# Altium schematic symbol library TitansLib.SchLib: 462 symbols (part 5 of 24)
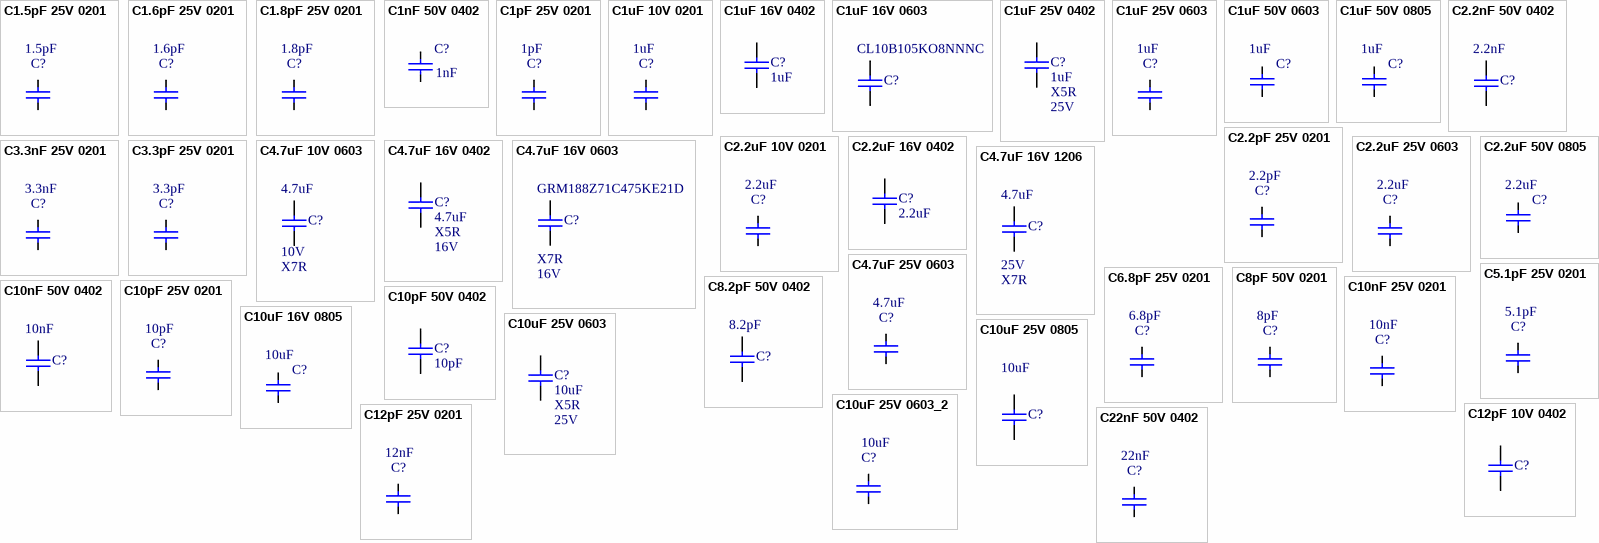
[diagram p21: symbols C1.5pF 25V 0201 to C22nF 50V 0402]

## C2.2pF 25V 0201
designator C?, comment value 2.2pF  (hidden comment: GRM0335C1E2R2CA01D)
25V 2.2pF C0G 0201 Multilayer Ceramic Capacitors MLCC - SMD/SMT ROHS; Manufacturer: Murata; Manufacturer Lifecycle Status: IN PRODUCTION; Temperature Coefficient: 30ppm/°C; Supplier: DigiKey; Supplier Part Number: 490-11293-1-ND; Manufacturer Part Number: GRM0335C1E2R2CA01D; RoHS: Compliant; Category: Ceramic Capacitors; Stock: 370916; Pricing: 1=0.1, 10=0.013, 50=0.0086, 100=0.0072, 500=0.00494, 1000=0.00424, 2500=0.00351, 5000=0.00308 (USD); Case/Package: 0201; Case Code (Imperial): 0201; Case Code (Metric): 0603; Dielectric: C0G; Dielectric Material: Ceramic; Export Control Classification Number (ECCN) Code: EAR99; Height: 300µm; Harmonized Tariff Schedule (HTS) Code: 8532.24.00.20; Introduction Date: 2013-05-17; Lead Free: Lead Free; Length: 600µm; Lifecycle Status: Production; Material: Ceramic; Max Operating Temperature: 125°C; Min Operating Temperature: -55°C; Mounting Technology: Surface Mount; Number of Terminals: 2; Packaging: Cut Tape; REACH SVHC: Yes; Schedule B: 8532240020, 8532240020|8532240020|8532240020|8532240020|8532240020; Termination: SMD/SMT; Thickness: 300µm; Voltage Rating: 25V; Voltage Rating (DC): 25V; Width: 300µm; ComponentLink1URL: https://datasheet.octopart.com:443/GRM0335C1E2R2CA01D-Murata-datasheet-62317014.pdf?src-supplier=element14+APAC; ComponentLink1Description: https://datasheet.octopart.com:443/GRM0335C1E2R2CA01D-Murata-datasheet-62317014.pdf?src-supplier=element14+APAC; ComponentLink2URL: https://datasheet.octopart.com:443/GRM0335C1E2R2CA01D-Murata-datasheet-165579666.pdf?src-supplier=TME; ComponentLink2Description: https://datasheet.octopart.com:443/GRM0335C1E2R2CA01D-Murata-datasheet-165579666.pdf?src-supplier=TME; ComponentLink3URL: https://datasheet.octopart.com:443/GRM0335C1E2R2CA01D-Murata-datasheet-141273941.pdf?src-supplier=Ciiva; ComponentLink3Description: https://datasheet.octopart.com:443/GRM0335C1E2R2CA01D-Murata-datasheet-141273941.pdf?src-supplier=Ciiva; ComponentLink4URL: https://datasheet.octopart.com:443/GRM0335C1E2R2CA01D-Murata-datasheet-140673953.pdf?src-supplier=Ciiva; ComponentLink4Description: https://datasheet.octopart.com:443/GRM0335C1E2R2CA01D-Murata-datasheet-140673953.pdf?src-supplier=Ciiva; ComponentLink5URL: https://datasheet.octopart.com:443/GRM0335C1E2R2CA01D-Murata-datasheet-138736733.pdf?src-supplier=Ciiva; ComponentLink5Description: https://datasheet.octopart.com:443/GRM0335C1E2R2CA01D-Murata-datasheet-138736733.pdf?src-supplier=Ciiva; ComponentLink6URL: https://datasheet.octopart.com:443/GRM0335C1E2R2CA01D-Murata-datasheet-102370999.pdf?src-supplier=HQonline; ComponentLink6Description: https://datasheet.octopart.com:443/GRM0335C1E2R2CA01D-Murata-datasheet-102370999.pdf?src-supplier=HQonline; ComponentLink7URL: https://datasheet.octopart.com:443/GRM0335C1E2R2CA01D-Murata-datasheet-22122223.pdf?src-supplier=Future+Electronics; ComponentLink7Description: https://datasheet.octopart.com:443/GRM0335C1E2R2CA01D-Murata-datasheet-22122223.pdf?src-supplier=Future+Electronics; ComponentLink8URL: https://datasheet.octopart.com:443/GRM0335C1E2R2CA01D-Murata-datasheet-12552025.pdf?src-supplier=Future+Electronics; ComponentLink8Description: https://datasheet.octopart.com:443/GRM0335C1E2R2CA01D-Murata-datasheet-12552025.pdf?src-supplier=Future+Electronics; ComponentLink9URL: https://datasheet.octopart.com/GRM0335C1E2R2CA01D-Murata-datasheet-12515295.pdf; ComponentLink9Description: https://datasheet.octopart.com/GRM0335C1E2R2CA01D-Murata-datasheet-12515295.pdf; ComponentLink10URL: https://datasheet.octopart.com/GRM0335C1E2R2CA01D-Murata-datasheet-12510076.pdf; ComponentLink10Description: https://datasheet.octopart.com/GRM0335C1E2R2CA01D-Murata-datasheet-12510076.pdf; ComponentLink11URL: https://datasheet.octopart.com/GRM0335C1E2R2CA01D-Murata-datasheet-11978611.pdf; ComponentLink11Description: https://datasheet.octopart.com/GRM0335C1E2R2CA01D-Murata-datasheet-11978611.pdf; ComponentLink12URL: https://datasheet.octopart.com/GRM0335C1E2R2CA01D-Murata-datasheet-10025737.pdf; ComponentLink12Description: https://datasheet.octopart.com/GRM0335C1E2R2CA01D-Murata-datasheet-10025737.pdf; ComponentLink13URL: https://datasheet.octopart.com/GRM0335C1E2R2CA01D-Murata-datasheet-8819587.pdf; ComponentLink13Description: https://datasheet.octopart.com/GRM0335C1E2R2CA01D-Murata-datasheet-8819587.pdf; ComponentLink14URL: https://datasheet.octopart.com/GRM0335C1E2R2CA01D-Murata-datasheet-14398016.pdf; ComponentLink14Description: https://datasheet.octopart.com/GRM0335C1E2R2CA01D-Murata-datasheet-14398016.pdf; ComponentLink15URL: http://sigma.octopart.com:80/reach_statement/Murata-company-16.pdf?src-supplier=Compliance+Statements; ComponentLink15Description: http://sigma.octopart.com:80/reach_statement/Murata-company-16.pdf?src-supplier=Compliance+Statements
footprint CAPC0603X03N (Chip Capacitor, 2-Leads, Body 0.60x0.30mm, IPC Medium Density)
pins: 1, 2

## C2.2uF 10V 0201
designator C?, comment value 2.2uF  (hidden comment: GRM033R61A225KE47D)
10V 2.2uF X5R ±10% 0201 Multilayer Ceramic Capacitors MLCC - SMD/SMT ROHS; Manufacturer: Murata; Manufacturer Lifecycle Status: IN PRODUCTION; Supplier: DigiKey; Supplier Part Number: 490-13227-1-ND; Manufacturer Part Number: GRM033R61A225KE47D; RoHS: Compliant; Category: Ceramic Capacitors; Stock: 2131851; Pricing: 1=0.14, 10=0.085, 50=0.068, 100=0.0512, 500=0.04, 1000=0.036, 2500=0.032, 5000=0.0296 (USD); Case/Package: 0201; Case Code (Imperial): 0201; Case Code (Metric): 0603; Country of Origin: Japan, Mainland China, Philippines, Singapore, Thailand; Dielectric: X5R; Dielectric Material: Ceramic; Export Control Classification Number (ECCN) Code: EAR99; Height: 300µm; Harmonized Tariff Schedule (HTS) Code: 8532.24.00.20; Introduction Date: 2017-02-17; Length: 600µm; Lifecycle Status: Production; Material: Ceramic; Max Operating Temperature: 85°C; Min Operating Temperature: -55°C; Mounting Technology: Surface Mount; Number of Terminals: 2; REACH SVHC: Yes; Schedule B: 8532240020, 8532240020|8532240020|8532240020|8532240020|8532240020|8532240020|8532240020|8532240020|8532240020|8532240020|8532240020|8532240020|8532240020|8532240020|8532240020|8532240020|8532240020|8532240020|8532240020|8532240020|8532240020|8532240020|8532240020|85; Thickness: 300µm; Tolerance: 10%; Voltage Rating: 10V; Voltage Rating (DC): 10V; Width: 300µm; ComponentLink1URL: https://datasheet.octopart.com:443/GRM033R61A225KE47D-Murata-datasheet-179072677.pdf?src-supplier=Arrow.cn; ComponentLink1Description: https://datasheet.octopart.com:443/GRM033R61A225KE47D-Murata-datasheet-179072677.pdf?src-supplier=Arrow.cn; ComponentLink2URL: https://datasheet.octopart.com:443/GRM033R61A225KE47D-Murata-datasheet-165579666.pdf?src-supplier=TME; ComponentLink2Description: https://datasheet.octopart.com:443/GRM033R61A225KE47D-Murata-datasheet-165579666.pdf?src-supplier=TME; ComponentLink3URL: https://datasheet.octopart.com:443/GRM033R61A225KE47D-Murata-datasheet-141274204.pdf?src-supplier=Ciiva; ComponentLink3Description: https://datasheet.octopart.com:443/GRM033R61A225KE47D-Murata-datasheet-141274204.pdf?src-supplier=Ciiva; ComponentLink4URL: https://datasheet.octopart.com:443/GRM033R61A225KE47D-Murata-datasheet-140676278.pdf?src-supplier=Ciiva; ComponentLink4Description: https://datasheet.octopart.com:443/GRM033R61A225KE47D-Murata-datasheet-140676278.pdf?src-supplier=Ciiva; ComponentLink5URL: https://datasheet.octopart.com:443/GRM033R61A225KE47D-Murata-datasheet-138738405.pdf?src-supplier=Ciiva; ComponentLink5Description: https://datasheet.octopart.com:443/GRM033R61A225KE47D-Murata-datasheet-138738405.pdf?src-supplier=Ciiva; ComponentLink6URL: https://datasheet.octopart.com:443/GRM033R61A225KE47D-Murata-datasheet-102370999.pdf?src-supplier=HQonline; ComponentLink6Description: https://datasheet.octopart.com:443/GRM033R61A225KE47D-Murata-datasheet-102370999.pdf?src-supplier=HQonline; ComponentLink7URL: https://datasheet.octopart.com:443/GRM033R61A225KE47D-Murata-datasheet-86568078.pdf?src-supplier=Future+Electronics; ComponentLink7Description: https://datasheet.octopart.com:443/GRM033R61A225KE47D-Murata-datasheet-86568078.pdf?src-supplier=Future+Electronics; ComponentLink8URL: https://datasheet.octopart.com/GRM033R61A225KE47D-Murata-datasheet-12515295.pdf; ComponentLink8Description: https://datasheet.octopart.com/GRM033R61A225KE47D-Murata-datasheet-12515295.pdf; ComponentLink9URL: https://datasheet.octopart.com/GRM033R61A225KE47D-Murata-datasheet-12510076.pdf; ComponentLink9Description: https://datasheet.octopart.com/GRM033R61A225KE47D-Murata-datasheet-12510076.pdf; ComponentLink10URL: https://datasheet.octopart.com/GRM033R61A225KE47D-Murata-datasheet-11978611.pdf; ComponentLink10Description: https://datasheet.octopart.com/GRM033R61A225KE47D-Murata-datasheet-11978611.pdf; ComponentLink11URL: https://datasheet.octopart.com/GRM033R61A225KE47D-Murata-datasheet-10025737.pdf; ComponentLink11Description: https://datasheet.octopart.com/GRM033R61A225KE47D-Murata-datasheet-10025737.pdf; ComponentLink12URL: https://datasheet.octopart.com/GRM033R61A225KE47D-Murata-datasheet-8819587.pdf; ComponentLink12Description: https://datasheet.octopart.com/GRM033R61A225KE47D-Murata-datasheet-8819587.pdf; ComponentLink13URL: http://sigma.octopart.com:80/reach_statement/Murata-company-16.pdf?src-supplier=Compliance+Statements; ComponentLink13Description: http://sigma.octopart.com:80/reach_statement/Murata-company-16.pdf?src-supplier=Compliance+Statements; Supplier 1: DigiKey; Supplier Part Number 1: 490-13227-1-ND; Supplier 2: DigiKey; Supplier Part Number 2: 490-13227-2-ND; Supplier 3: Mouser; Supplier Part Number 3: 81-GRM033R61A225KE7D
footprint CAPC0603X03N (Chip Capacitor, 2-Leads, Body 0.60x0.30mm, IPC Medium Density)
pins: 1, 2

## C2.2uF 16V 0402
designator C?, comment 2.2uF
2.2uF 16V X5R 20% 0402; Manufacturer: Samsung Electro-Mechanics; Manufacturer Part Number: CL05A225MO5NQNC; Type: Capacitor; Package: 0402 (1005 Metric); Tolerance: 20%; Temp Coef: X5R; Voltage: 16V; Supplier 1: Mouser; Supplier Part Number 1: 187-CL05A225MO5NQNC; Value: 2.2uF
footprint C0402_H0P7
pins: 1, 2

## C2.2uF 25V 0603
designator C?, comment value 2.2uF  (hidden comment: GRM188R61E225KA12D)
25V 2.2uF X5R ±10% 0603 Multilayer Ceramic Capacitors MLCC - SMD/SMT ROHS; Manufacturer: Murata; Manufacturer Lifecycle Status: IN PRODUCTION; Supplier: DigiKey; Supplier Part Number: 490-10731-1-ND; Manufacturer Part Number: GRM188R61E225KA12D; RoHS: Compliant; Category: Ceramic Capacitors; Stock: 245508; Pricing: 1=0.1, 10=0.048, 50=0.0328, 100=0.0283, 500=0.0259 (USD); Case/Package: 0603; Case Code (Imperial): 0603; Case Code (Metric): 1608; Composition: Ceramic; Country of Origin: Japan, Mainland China, Philippines, Singapore, Thailand; Depth: 800µm; Dielectric: X5R; Dielectric Material: Ceramic; Export Control Classification Number (ECCN) Code: EAR99; Height: 800µm; Harmonized Tariff Schedule (HTS) Code: 8532.24.00.20; Introduction Date: 2012-10-01; Lead Free: Lead Free; Length: 1.6mm; Lifecycle Status: Production; Material: Ceramic; Max Operating Temperature: 85°C; Min Operating Temperature: -55°C; Mounting Technology: Surface Mount; Pins: 2; Number of Terminals: 2; Packaging: Cut Tape; Radiation Hardening: No; REACH SVHC: Yes; Schedule B: 8532240020, 8532240020|8532240020, 8532240020|8532240020|8532240020, 8532240020|8532240020|8532240020|8532240020; Termination: SMD/SMT; Thickness: 800µm; Tolerance: 10%; Voltage: 25V; Voltage Rating: 25V; Voltage Rating (DC): 25V; Weight: 6.293594mg; Width: 800µm; ComponentLink1URL: https://datasheet.octopart.com:443/GRM188R61E225KA12D-Murata-datasheet-62317198.pdf?src-supplier=element14+APAC; ComponentLink1Description: https://datasheet.octopart.com:443/GRM188R61E225KA12D-Murata-datasheet-62317198.pdf?src-supplier=element14+APAC; ComponentLink2URL: https://datasheet.octopart.com:443/GRM188R61E225KA12D-Murata-datasheet-17853099.pdf?src-supplier=element14+APAC; ComponentLink2Description: https://datasheet.octopart.com:443/GRM188R61E225KA12D-Murata-datasheet-17853099.pdf?src-supplier=element14+APAC; ComponentLink3URL: https://datasheet.octopart.com/GRM188R61E225KA12D-Murata-datasheet-12515295.pdf; ComponentLink3Description: https://datasheet.octopart.com/GRM188R61E225KA12D-Murata-datasheet-12515295.pdf; ComponentLink4URL: https://datasheet.octopart.com/GRM188R61E225KA12D-Murata-datasheet-12510076.pdf; ComponentLink4Description: https://datasheet.octopart.com/GRM188R61E225KA12D-Murata-datasheet-12510076.pdf; ComponentLink5URL: https://datasheet.octopart.com/GRM188R61E225KA12D-Murata-datasheet-11978611.pdf; ComponentLink5Description: https://datasheet.octopart.com/GRM188R61E225KA12D-Murata-datasheet-11978611.pdf; ComponentLink6URL: https://datasheet.octopart.com/GRM188R61E225KA12D-Murata-datasheet-10025737.pdf; ComponentLink6Description: https://datasheet.octopart.com/GRM188R61E225KA12D-Murata-datasheet-10025737.pdf; ComponentLink7URL: https://datasheet.octopart.com/GRM188R61E225KA12D-Murata-datasheet-8819587.pdf; ComponentLink7Description: https://datasheet.octopart.com/GRM188R61E225KA12D-Murata-datasheet-8819587.pdf; ComponentLink8URL: https://datasheet.octopart.com/GRM188R61E225KA12D-Murata-datasheet-14397280.pdf; ComponentLink8Description: https://datasheet.octopart.com/GRM188R61E225KA12D-Murata-datasheet-14397280.pdf; ComponentLink9URL: https://datasheet.octopart.com:443/GRM188R61E225KA12D-Murata-datasheet-165579666.pdf?src-supplier=TME; ComponentLink9Description: https://datasheet.octopart.com:443/GRM188R61E225KA12D-Murata-datasheet-165579666.pdf?src-supplier=TME; ComponentLink10URL: https://datasheet.octopart.com:443/GRM188R61E225KA12D-Murata-datasheet-141274968.pdf?src-supplier=Ciiva; ComponentLink10Description: https://datasheet.octopart.com:443/GRM188R61E225KA12D-Murata-datasheet-141274968.pdf?src-supplier=Ciiva; ComponentLink11URL: https://datasheet.octopart.com:443/GRM188R61E225KA12D-Murata-datasheet-140705128.pdf?src-supplier=Ciiva; ComponentLink11Description: https://datasheet.octopart.com:443/GRM188R61E225KA12D-Murata-datasheet-140705128.pdf?src-supplier=Ciiva; ComponentLink12URL: https://datasheet.octopart.com:443/GRM188R61E225KA12D-Murata-datasheet-138742892.pdf?src-supplier=Ciiva; ComponentLink12Description: https://datasheet.octopart.com:443/GRM188R61E225KA12D-Murata-datasheet-138742892.pdf?src-supplier=Ciiva; ComponentLink13URL: https://datasheet.octopart.com:443/GRM188R61E225KA12D-Murata-datasheet-22122223.pdf?src-supplier=Future+Electronics; ComponentLink13Description: https://datasheet.octopart.com:443/GRM188R61E225KA12D-Murata-datasheet-22122223.pdf?src-supplier=Future+Electronics; ComponentLink14URL: https://datasheet.octopart.com:443/GRM188R61E225KA12D-Murata-datasheet-8817987.pdf?src-supplier=Newark; ComponentLink14Description: https://datasheet.octopart.com:443/GRM188R61E225KA12D-Murata-datasheet-8817987.pdf?src-supplier=Newark; ComponentLink15URL: http://sigma.octopart.com:80/reach_statement/Murata-company-16.pdf?src-supplier=Compliance+Statements; ComponentLink15Description: http://sigma.octopart.com:80/reach_statement/Murata-company-16.pdf?src-supplier=Compliance+Statements
footprint CAPC1608X10N (Chip Capacitor, 2-Leads, Body 1.60x0.80mm, IPC Medium Density)
pins: 1, 2

## C2.2uF 50V 0805
designator C?, comment value 2.2uF  (hidden comment: UMK212BB7225KG-T)
0805 2.2 uF 50 V ±10% Tolerance X7R Surface Mount Multilayer Ceramic Capacitor; Manufacturer 1: Taiyo Yuden; Voltage Rating: 50V; Supplier 1: DigiKey; Supplier Part Number 1: 587-3169-1-ND; Manufacturer Part Number 1: UMK212BB7225KG-T; RoHS: Compliant; Category: Ceramic Capacitors; Stock: 380895; Supplier Unit Price 1: 0.29; Case/Package: 0805; Case Code (Imperial): 0805; Case Code (Metric): 2012; Depth: 1.25mm; Dielectric: X7R; Dielectric Material: Ceramic; Halogen Free: Halogen Free; Height: 1.25mm; Lead Free: Lead Free; Length: 2mm; Lifecycle Status: Production; Material: Ceramic; Max Operating Temperature: 125°C; Min Operating Temperature: -55°C; Mounting Technology: Surface Mount; Number of Terminals: 2; Radiation Hardening: No; REACH SVHC: Yes; Schedule B: 8532240020; Termination: SMD/SMT; Thickness: 1.4478mm; Tolerance: 10%; Voltage Rating (DC): 50V; Width: 1.25mm; ComponentLink1URL: https://datasheet.octopart.com:443/UMK212BB7225KG-T-Taiyo-Yuden-datasheet-182121079.pdf?src-supplier=IHS; ComponentLink1Description: https://datasheet.octopart.com:443/UMK212BB7225KG-T-Taiyo-Yuden-datasheet-182121079.pdf?src-supplier=IHS; ComponentLink2URL: https://datasheet.octopart.com:443/UMK212BB7225KG-T-Taiyo-Yuden-datasheet-151625811.pdf?src-supplier=element14+APAC; ComponentLink2Description: https://datasheet.octopart.com:443/UMK212BB7225KG-T-Taiyo-Yuden-datasheet-151625811.pdf?src-supplier=element14+APAC; ComponentLink3URL: https://datasheet.octopart.com:443/UMK212BB7225KG-T-Taiyo-Yuden-datasheet-33009199.pdf?src-supplier=Newark; ComponentLink3Description: https://datasheet.octopart.com:443/UMK212BB7225KG-T-Taiyo-Yuden-datasheet-33009199.pdf?src-supplier=Newark; ComponentLink4URL: https://datasheet.octopart.com:443/UMK212BB7225KG-T-Taiyo-Yuden-datasheet-154810193.pdf?src-supplier=Master+Electronics; ComponentLink4Description: https://datasheet.octopart.com:443/UMK212BB7225KG-T-Taiyo-Yuden-datasheet-154810193.pdf?src-supplier=Master+Electronics; ComponentLink5URL: https://datasheet.octopart.com:443/UMK212BB7225KG-T-Taiyo-Yuden-datasheet-140473435.pdf?src-supplier=Master+Electronics; ComponentLink5Description: https://datasheet.octopart.com:443/UMK212BB7225KG-T-Taiyo-Yuden-datasheet-140473435.pdf?src-supplier=Master+Electronics; ComponentLink6URL: https://datasheet.octopart.com/UMK212BB7225KG-T-Taiyo-Yuden-datasheet-13698913.pdf; ComponentLink6Description: https://datasheet.octopart.com/UMK212BB7225KG-T-Taiyo-Yuden-datasheet-13698913.pdf; ComponentLink7URL: https://datasheet.octopart.com:443/UMK212BB7225KG-T-Taiyo-Yuden-datasheet-138738940.pdf?src-supplier=Taiyo+Yuden+SCT; ComponentLink7Description: https://datasheet.octopart.com:443/UMK212BB7225KG-T-Taiyo-Yuden-datasheet-138738940.pdf?src-supplier=Taiyo+Yuden+SCT; ComponentLink8URL: https://datasheet.octopart.com:443/UMK212BB7225KG-T-Taiyo-Yuden-datasheet-103094781.pdf?src-supplier=Future+Electronics; ComponentLink8Description: https://datasheet.octopart.com:443/UMK212BB7225KG-T-Taiyo-Yuden-datasheet-103094781.pdf?src-supplier=Future+Electronics; ComponentLink9URL: https://datasheet.octopart.com:443/UMK212BB7225KG-T-Taiyo-Yuden-datasheet-99833418.pdf?src-supplier=Future+Electronics; ComponentLink9Description: https://datasheet.octopart.com:443/UMK212BB7225KG-T-Taiyo-Yuden-datasheet-99833418.pdf?src-supplier=Future+Electronics; ComponentLink10URL: https://datasheet.octopart.com:443/UMK212BB7225KG-T-Taiyo-Yuden-datasheet-62109645.pdf?src-supplier=Electro+Sonic; ComponentLink10Description: https://datasheet.octopart.com:443/UMK212BB7225KG-T-Taiyo-Yuden-datasheet-62109645.pdf?src-supplier=Electro+Sonic; ComponentLink11URL: https://datasheet.octopart.com:443/UMK212BB7225KG-T-Taiyo-Yuden-datasheet-41181901.pdf?src-supplier=Electro+Sonic; ComponentLink11Description: https://datasheet.octopart.com:443/UMK212BB7225KG-T-Taiyo-Yuden-datasheet-41181901.pdf?src-supplier=Electro+Sonic
footprint CAP0805-M (Chip Capacitor, 2-Leads, Body 2.00x1.25mm, IPC Medium Density)
pins: 1, 2

## C3.3nF 25V 0201
designator C?, comment value 3.3nF  (hidden comment: GRM033R71E332KA12D)
25V 3.3nF X7R ±10% 0201 Multilayer Ceramic Capacitors MLCC - SMD/SMT ROHS; Manufacturer: Murata; Manufacturer Lifecycle Status: IN PRODUCTION; Supplier: DigiKey; Supplier Part Number: 490-17827-1-ND; Manufacturer Part Number: GRM033R71E332KA12D; RoHS: Compliant; Category: Ceramic Capacitors; Stock: 193900; Pricing: 1=0.1, 10=0.013, 50=0.0086, 100=0.0072, 500=0.00494, 1000=0.00424, 2500=0.00351, 5000=0.00308 (USD); Case/Package: 0201; Case Code (Imperial): 0201; Case Code (Metric): 0603; Composition: Ceramic; Dielectric: X7R; Dielectric Material: Ceramic; Height: 300µm; Length: 600µm; Lifecycle Status: Production; Material: Ceramic; Max Operating Temperature: 125°C; Min Operating Temperature: -55°C; Mounting Technology: Surface Mount; Number of Terminals: 2; Packaging: Tape & Reel (TR); REACH SVHC: Yes; Schedule B: 8532240020, 8532240020|8532240020, 8532240020|8532240020|8532240020, 8532240020|8532240020|8532240020|8532240020; Termination: SMD/SMT; Thickness: 300µm; Tolerance: 10%; Voltage Rating: 25V; Voltage Rating (DC): 25V; Weight: 340.194278µg; Width: 300µm; ComponentLink1URL: https://datasheet.octopart.com:443/GRM033R71E332KA12D-Murata-datasheet-165579666.pdf?src-supplier=TME; ComponentLink1Description: https://datasheet.octopart.com:443/GRM033R71E332KA12D-Murata-datasheet-165579666.pdf?src-supplier=TME; ComponentLink2URL: https://datasheet.octopart.com:443/GRM033R71E332KA12D-Murata-datasheet-140678106.pdf?src-supplier=Ciiva; ComponentLink2Description: https://datasheet.octopart.com:443/GRM033R71E332KA12D-Murata-datasheet-140678106.pdf?src-supplier=Ciiva; ComponentLink3URL: https://datasheet.octopart.com:443/GRM033R71E332KA12D-Murata-datasheet-140677062.pdf?src-supplier=Ciiva; ComponentLink3Description: https://datasheet.octopart.com:443/GRM033R71E332KA12D-Murata-datasheet-140677062.pdf?src-supplier=Ciiva; ComponentLink4URL: https://datasheet.octopart.com:443/GRM033R71E332KA12D-Murata-datasheet-138738684.pdf?src-supplier=Ciiva; ComponentLink4Description: https://datasheet.octopart.com:443/GRM033R71E332KA12D-Murata-datasheet-138738684.pdf?src-supplier=Ciiva; ComponentLink5URL: https://datasheet.octopart.com/GRM033R71E332KA12D-Murata-datasheet-12515295.pdf; ComponentLink5Description: https://datasheet.octopart.com/GRM033R71E332KA12D-Murata-datasheet-12515295.pdf; ComponentLink6URL: https://datasheet.octopart.com/GRM033R71E332KA12D-Murata-datasheet-12510076.pdf; ComponentLink6Description: https://datasheet.octopart.com/GRM033R71E332KA12D-Murata-datasheet-12510076.pdf; ComponentLink7URL: https://datasheet.octopart.com/GRM033R71E332KA12D-Murata-datasheet-11978611.pdf; ComponentLink7Description: https://datasheet.octopart.com/GRM033R71E332KA12D-Murata-datasheet-11978611.pdf; ComponentLink8URL: https://datasheet.octopart.com/GRM033R71E332KA12D-Murata-datasheet-10025737.pdf; ComponentLink8Description: https://datasheet.octopart.com/GRM033R71E332KA12D-Murata-datasheet-10025737.pdf; ComponentLink9URL: https://datasheet.octopart.com/GRM033R71E332KA12D-Murata-datasheet-8819587.pdf; ComponentLink9Description: https://datasheet.octopart.com/GRM033R71E332KA12D-Murata-datasheet-8819587.pdf; ComponentLink10URL: https://datasheet.octopart.com/GRM033R71E332KA12D-Murata-datasheet-38882223.pdf; ComponentLink10Description: https://datasheet.octopart.com/GRM033R71E332KA12D-Murata-datasheet-38882223.pdf; ComponentLink11URL: https://datasheet.octopart.com:443/GRM033R71E332KA12D-Murata-datasheet-140568783.pdf?src-supplier=Arrow.cn; ComponentLink11Description: https://datasheet.octopart.com:443/GRM033R71E332KA12D-Murata-datasheet-140568783.pdf?src-supplier=Arrow.cn; ComponentLink12URL: http://sigma.octopart.com:80/reach_statement/Murata-company-16.pdf?src-supplier=Compliance+Statements; ComponentLink12Description: http://sigma.octopart.com:80/reach_statement/Murata-company-16.pdf?src-supplier=Compliance+Statements; Supplier 1: DigiKey; Supplier Part Number 1: 490-17827-1-ND; Supplier 2: DigiKey; Supplier Part Number 2: 490-17827-2-ND; Supplier 3: Mouser; Supplier Part Number 3: 81-GRM033R71E332KA2D
footprint CAPC0603X03N (Chip Capacitor, 2-Leads, Body 0.60x0.30mm, IPC Medium Density)
pins: 1, 2

## C3.3pF 25V 0201
designator C?, comment value 3.3pF  (hidden comment: GRM0335C1E3R3BA01D)
0201 3.3 pF 25 V ±0.1 pF Tolerance C0G Multilayer Ceramic Chip Capacitor; Manufacturer: Murata; Manufacturer Lifecycle Status: IN PRODUCTION; Temperature Coefficient: 30ppm/°C; Voltage Rating: 25V; Supplier: DigiKey; Supplier Part Number: 490-11296-1-ND; Manufacturer Part Number: GRM0335C1E3R3BA01D; RoHS: Compliant; Category: Ceramic Capacitors; Stock: 260800; Pricing: 1=0.1, 10=0.018, 50=0.0116, 100=0.0098, 500=0.0068, 1000=0.00587, 2500=0.00491, 5000=0.00433 (USD); Case/Package: 0201; Case Code (Imperial): 0201; Case Code (Metric): 0603; Depth: 300µm; Dielectric: C0G; Dielectric Material: Ceramic; Export Control Classification Number (ECCN) Code: EAR99; Height: 300µm; Harmonized Tariff Schedule (HTS) Code: 8532.24.00.20; Introduction Date: 2013-05-17; Length: 600µm; Lifecycle Status: Production; Material: Ceramic; Max Operating Temperature: 125°C; Min Operating Temperature: -55°C; Mounting Technology: Surface Mount; Number of Terminals: 2; REACH SVHC: Yes; Schedule B: 8532240020, 8532240020|8532240020|8532240020|8532240020|8532240020; Termination: SMD/SMT; Thickness: 300µm; Voltage Rating (DC): 25V; Width: 300µm; ComponentLink1URL: https://datasheet.octopart.com:443/GRM0335C1E3R3BA01D-Murata-datasheet-141273978.pdf?src-supplier=Geoflip; ComponentLink1Description: https://datasheet.octopart.com:443/GRM0335C1E3R3BA01D-Murata-datasheet-141273978.pdf?src-supplier=Geoflip; ComponentLink2URL: https://datasheet.octopart.com:443/GRM0335C1E3R3BA01D-Murata-datasheet-165579666.pdf?src-supplier=TME; ComponentLink2Description: https://datasheet.octopart.com:443/GRM0335C1E3R3BA01D-Murata-datasheet-165579666.pdf?src-supplier=TME; ComponentLink3URL: https://datasheet.octopart.com:443/GRM0335C1E3R3BA01D-Murata-datasheet-140674001.pdf?src-supplier=Ciiva; ComponentLink3Description: https://datasheet.octopart.com:443/GRM0335C1E3R3BA01D-Murata-datasheet-140674001.pdf?src-supplier=Ciiva; ComponentLink4URL: https://datasheet.octopart.com:443/GRM0335C1E3R3BA01D-Murata-datasheet-138736781.pdf?src-supplier=Ciiva; ComponentLink4Description: https://datasheet.octopart.com:443/GRM0335C1E3R3BA01D-Murata-datasheet-138736781.pdf?src-supplier=Ciiva; ComponentLink5URL: https://datasheet.octopart.com:443/GRM0335C1E3R3BA01D-Murata-datasheet-96971104.pdf?src-supplier=Future+Electronics; ComponentLink5Description: https://datasheet.octopart.com:443/GRM0335C1E3R3BA01D-Murata-datasheet-96971104.pdf?src-supplier=Future+Electronics; ComponentLink6URL: https://datasheet.octopart.com:443/GRM0335C1E3R3BA01D-Murata-datasheet-98239046.pdf?src-supplier=Future+Electronics; ComponentLink6Description: https://datasheet.octopart.com:443/GRM0335C1E3R3BA01D-Murata-datasheet-98239046.pdf?src-supplier=Future+Electronics; ComponentLink7URL: https://datasheet.octopart.com:443/GRM0335C1E3R3BA01D-Murata-datasheet-32479577.pdf?src-supplier=HQonline; ComponentLink7Description: https://datasheet.octopart.com:443/GRM0335C1E3R3BA01D-Murata-datasheet-32479577.pdf?src-supplier=HQonline; ComponentLink8URL: https://datasheet.octopart.com/GRM0335C1E3R3BA01D-Murata-datasheet-12515295.pdf; ComponentLink8Description: https://datasheet.octopart.com/GRM0335C1E3R3BA01D-Murata-datasheet-12515295.pdf; ComponentLink9URL: https://datasheet.octopart.com/GRM0335C1E3R3BA01D-Murata-datasheet-12510076.pdf; ComponentLink9Description: https://datasheet.octopart.com/GRM0335C1E3R3BA01D-Murata-datasheet-12510076.pdf; ComponentLink10URL: https://datasheet.octopart.com/GRM0335C1E3R3BA01D-Murata-datasheet-11978611.pdf; ComponentLink10Description: https://datasheet.octopart.com/GRM0335C1E3R3BA01D-Murata-datasheet-11978611.pdf; ComponentLink11URL: https://datasheet.octopart.com/GRM0335C1E3R3BA01D-Murata-datasheet-10025737.pdf; ComponentLink11Description: https://datasheet.octopart.com/GRM0335C1E3R3BA01D-Murata-datasheet-10025737.pdf; ComponentLink12URL: https://datasheet.octopart.com/GRM0335C1E3R3BA01D-Murata-datasheet-8819587.pdf; ComponentLink12Description: https://datasheet.octopart.com/GRM0335C1E3R3BA01D-Murata-datasheet-8819587.pdf; ComponentLink13URL: https://datasheet.octopart.com/GRM0335C1E3R3BA01D-Murata-datasheet-14398041.pdf; ComponentLink13Description: https://datasheet.octopart.com/GRM0335C1E3R3BA01D-Murata-datasheet-14398041.pdf; ComponentLink14URL: http://sigma.octopart.com:80/reach_statement/Murata-company-16.pdf?src-supplier=Compliance+Statements; ComponentLink14Description: http://sigma.octopart.com:80/reach_statement/Murata-company-16.pdf?src-supplier=Compliance+Statements
footprint CAPC0603X03N (Chip Capacitor, 2-Leads, Body 0.60x0.30mm, IPC Medium Density)
pins: 1, 2

## C4.7uF 10V 0603
designator C?, comment Temperature Characteristics Code: X7R  Rated DC Voltage (URdc): 10V  (hidden comment: 4.7uF)
4.7uF 10V X7R 10% 0603; Manufacturer: Murata; Manufacturer Part Number: GRM188Z71A475KE15J; Dielectric Material: Ceramic; Multilayer: Yes; Supplier: Arrow Electronics; Supplier Part Number: GRM188Z71A475KE15J; RoHS: Yes; Category: Ceramic Capacitors; Stock: 10000; Pricing: 10000=0.0365 (USD); Mounting Technology: Surface Mount; Pins: 2; Package Shape: Rectangular; Case/Package: 0603; Terminal Finish: Nickel; Min Operating Temperature: -55°C; Max Operating Temperature: 125°C; JESD-609 Code: e3; Capacitor Type: Ceramic; Tolerance  (fill in as +-): 10%; Packaging: Tape and Reel; Tolerance (fill in as +-): 10%; Termination: Wraparound; Reach SVHC Compliant: Yes; RoHS Compliant: Yes; ComponentLink1URL: https://datasheet.ciiva.com:443/pdfs/VipMasterIC/IC/MURE/MURE-S-A0004349797/MURE-S-A0004352832-1.pdf?src-supplier=IHS+Markit; ComponentLink1Description: https://datasheet.ciiva.com:443/pdfs/VipMasterIC/IC/MURE/MURE-S-A0004349797/MURE-S-A0004352832-1.pdf?src-supplier=IHS+Markit; Value: 4.7uF
footprint C0603_H0P8
pins: 1, 2

## C4.7uF 16V 0402
designator C?, comment Temp Coef: X5R  Voltage: 16V  (hidden comment: 4.7uF)
4.7uF 16V X5R 20% 0402; Manufacturer: Samsung Electro-Mechanics; Manufacturer Part Number: CL05A475MO5NUNC; Type: Capacitor; Package: 0402 (1005 Metric); Supplier 1: Digikey; Supplier Part Number 1: 1276-6836-1-ND; Supplier Link 1: https://www.digikey.com/product-detail/en/samsung-electro-mechanics/CL05A475MO5NUNC/1276-6836-1-ND/5961695; Datasheet: http://www.samsungsem.com/kr/support/product-search/mlcc/__icsFiles/afieldfile/2019/05/29/Data%20sheet_CL05A475MO5NUNC.pdf; Tolerance: 20%; Value: 4.7uF
footprint C0402_H0P7
pins: 1, 2

## C4.7uF 16V 0603
designator C?, comment GRM188Z71C475KE21D  Rated DC Voltage (URdc): 16V  Temperature Characteristics Code: X7R
4.7uF 16V X7R 10% 0603; Manufacturer: Murata; Dielectric Material: Ceramic; Multilayer: Yes; Supplier: Digikey; Supplier Part Number: 490-GRM188Z71C475KE21DTR-ND; Manufacturer Part Number: GRM188Z71C475KE21D; RoHS: Yes; Category: Ceramic Capacitors; Stock: 108906; Pricing: 4000=0.05292, 8000=0.04767, 12000=0.0464, 20000=0.04578, 28000=0.04466, 40000=0.04357, 48000=0.04306, 96000=0.04151, 100000=0.04124 (USD); Mounting Technology: Surface Mount; Pins: 2; Package Shape: Rectangular; Case/Package: 0603; Terminal Finish: Nickel; Min Operating Temperature: -55°C; Max Operating Temperature: 125°C; JESD-609 Code: e3; Value: 4.7uF; Capacitor Type: Ceramic; Tolerance  (fill in as +-): 10%; Packaging: Tape and Reel; Tolerance (fill in as +-): 10%; Termination: Wraparound; Reach SVHC Compliant: Yes; RoHS Compliant: Yes; ComponentLink1URL: https://psearch.en.murata.com:443/capacitor/product/GRM188Z71C475KE21%23.pdf?src-supplier=IHS+Markit; ComponentLink1Description: https://psearch.en.murata.com:443/capacitor/product/GRM188Z71C475KE21%23.pdf?src-supplier=IHS+Markit; ComponentLink2URL: https://datasheet.octopart.com/GRM188Z71C475KE21D-Murata-datasheet-165579666.pdf?src-supplier=TME; ComponentLink2Description: https://datasheet.octopart.com/GRM188Z71C475KE21D-Murata-datasheet-165579666.pdf?src-supplier=TME; Supplier 1: DigiKey; Supplier Part Number 1: 490-GRM188Z71C475KE21DCT-ND; Supplier 2: DigiKey; Supplier Part Number 2: 490-GRM188Z71C475KE21DDKR-ND; Supplier 3: Mouser; Supplier Part Number 3: 81-GRM188Z71C475KE1D; Supplier 4: LCSC; Supplier Part Number 4: C389010
footprint C0603_H0P8
pins: 1, 2

## C4.7uF 16V 1206
designator C?, comment Temperature Characteristics Code: X7R  Rated DC Voltage (URdc): 25V  (hidden comment: 4.7uF)
4.7uF 16V X7R 10% 1206; Manufacturer: Murata; Manufacturer Part Number: GCM31CR71E475KA55L; Dielectric Material: Ceramic; Multilayer: Yes; Reference Standard: AEC-Q200; Supplier Part Number: GCM31CR71E475KA55L; RoHS: Yes; Category: Ceramic Capacitors; Stock: 6000; Pricing: 2000=0.05338, 4000=0.05338, 8000=0.05338, 12000=0.05338, 16000=0.05338 (USD); Mounting Technology: Surface Mount; Pins: 2; Package Shape: Rectangular; Case/Package: 1206; Terminal Finish: Nickel; Min Operating Temperature: -55°C; Max Operating Temperature: 125°C; JESD-609 Code: e3; Capacitor Type: Ceramic; Tolerance  (fill in as +-): 10%; Package Style: SMTMeter; Packaging: Tape and Reel; Tolerance (fill in as +-): 10%; Termination: Wraparound; Length: 3.2mm; Width: 1.6mm; Height: 1.8mm; Reach SVHC Compliant: Yes; RoHS Compliant: Yes; ComponentLink1URL: https://datasheet.ciiva.com:443/pdfs/VipMasterIC/IC/MURE/MURE-S-A0004442191/MURE-S-A0004445513-1.pdf?src-supplier=IHS+Markit; ComponentLink1Description: https://datasheet.ciiva.com:443/pdfs/VipMasterIC/IC/MURE/MURE-S-A0004442191/MURE-S-A0004445513-1.pdf?src-supplier=IHS+Markit; ComponentLink2URL: https://datasheet.ciiva.com/140/product-140163.pdf?src-supplier=Digikey; ComponentLink2Description: https://datasheet.ciiva.com/140/product-140163.pdf?src-supplier=Digikey; ComponentLink3URL: https://datasheet.ciiva.com/11787/0900766b80ef92d0-11787096.pdf?src-supplier=Rs; ComponentLink3Description: https://datasheet.ciiva.com/11787/0900766b80ef92d0-11787096.pdf?src-supplier=Rs; ComponentLink4URL: https://datasheet.ciiva.com/18183/getdatasheetpartid-255795-18183748.pdf?src-supplier=Verical; ComponentLink4Description: https://datasheet.ciiva.com/18183/getdatasheetpartid-255795-18183748.pdf?src-supplier=Verical; ComponentLink5URL: https://datasheet.ciiva.com/140/product-140162.pdf?src-supplier=Digikey; ComponentLink5Description: https://datasheet.ciiva.com/140/product-140162.pdf?src-supplier=Digikey; ComponentLink6URL: https://datasheet.ciiva.com/140/product-140164.pdf?src-supplier=Digikey; ComponentLink6Description: https://datasheet.ciiva.com/140/product-140164.pdf?src-supplier=Digikey; ComponentLink7URL: https://datasheet.ciiva.com/11613/product-11613353.pdf?src-supplier=Avnet; ComponentLink7Description: https://datasheet.ciiva.com/11613/product-11613353.pdf?src-supplier=Avnet; Supplier: Avnet; Value: 4.7uF
footprint C1206_H1P6
pins: 1, 2

## C4.7uF 25V 0603
designator C?, comment value 4.7uF  (hidden comment: GRM188R61E475KE11D)
25V 4.7uF X5R ±10% 0603 Multilayer Ceramic Capacitors MLCC - SMD/SMT ROHS; Manufacturer: Murata; Manufacturer Lifecycle Status: IN PRODUCTION; Supplier: DigiKey; Supplier Part Number: 490-7203-1-ND; Manufacturer Part Number: GRM188R61E475KE11D; RoHS: Compliant; Category: Ceramic Capacitors; Stock: 1616459; Pricing: 1=0.08, 10=0.038 (USD); Case/Package: 0603; Case Code (Imperial): 0603; Case Code (Metric): 1608; Country of Origin: Japan, Mainland China, Philippines, Singapore, Thailand; Depth: 800µm; Dielectric: X5R; Dielectric Material: Ceramic; Export Control Classification Number (ECCN) Code: EAR99; Height: 800µm; Harmonized Tariff Schedule (HTS) Code: 8532.24.00.20; Introduction Date: 2012-10-01; Lead Free: Lead Free; Length: 1.6mm; Lifecycle Status: Production; Material: Ceramic; Max Operating Temperature: 85°C; Min Operating Temperature: -55°C; Mounting Technology: Surface Mount; Number of Terminals: 2; REACH SVHC: Yes; Schedule B: 8532240020, 8532240020|8532240020, 8532240020|8532240020|8532240020, 8532240020|8532240020|8532240020|8532240020; Thickness: 800µm; Tolerance: 10%; Voltage: 25V; Voltage Rating: 25V; Voltage Rating (DC): 25V; Width: 800µm; ComponentLink1URL: https://datasheet.octopart.com:443/GRM188R61E475KE11D-Murata-datasheet-27203393.pdf?src-supplier=Newark; ComponentLink1Description: https://datasheet.octopart.com:443/GRM188R61E475KE11D-Murata-datasheet-27203393.pdf?src-supplier=Newark; ComponentLink2URL: https://datasheet.octopart.com:443/GRM188R61E475KE11D-Murata-datasheet-44506546.pdf?src-supplier=Newark; ComponentLink2Description: https://datasheet.octopart.com:443/GRM188R61E475KE11D-Murata-datasheet-44506546.pdf?src-supplier=Newark; ComponentLink3URL: https://datasheet.octopart.com:443/GRM188R61E475KE11D-Murata-datasheet-62317199.pdf?src-supplier=element14+APAC; ComponentLink3Description: https://datasheet.octopart.com:443/GRM188R61E475KE11D-Murata-datasheet-62317199.pdf?src-supplier=element14+APAC; ComponentLink4URL: https://datasheet.octopart.com:443/GRM188R61E475KE11D-Murata-datasheet-14397282.pdf?src-supplier=Future+Electronics; ComponentLink4Description: https://datasheet.octopart.com:443/GRM188R61E475KE11D-Murata-datasheet-14397282.pdf?src-supplier=Future+Electronics; ComponentLink5URL: https://datasheet.octopart.com:443/GRM188R61E475KE11D-Murata-datasheet-78375012.pdf?src-supplier=Future+Electronics; ComponentLink5Description: https://datasheet.octopart.com:443/GRM188R61E475KE11D-Murata-datasheet-78375012.pdf?src-supplier=Future+Electronics; ComponentLink6URL: https://datasheet.octopart.com:443/GRM188R61E475KE11D-Murata-datasheet-179108037.pdf?src-supplier=Arrow.cn; ComponentLink6Description: https://datasheet.octopart.com:443/GRM188R61E475KE11D-Murata-datasheet-179108037.pdf?src-supplier=Arrow.cn; ComponentLink7URL: https://datasheet.octopart.com:443/GRM188R61E475KE11D-Murata-datasheet-165579666.pdf?src-supplier=TME; ComponentLink7Description: https://datasheet.octopart.com:443/GRM188R61E475KE11D-Murata-datasheet-165579666.pdf?src-supplier=TME; ComponentLink8URL: https://datasheet.octopart.com:443/GRM188R61E475KE11D-Murata-datasheet-141274968.pdf?src-supplier=Ciiva; ComponentLink8Description: https://datasheet.octopart.com:443/GRM188R61E475KE11D-Murata-datasheet-141274968.pdf?src-supplier=Ciiva; ComponentLink9URL: https://datasheet.octopart.com:443/GRM188R61E475KE11D-Murata-datasheet-140705133.pdf?src-supplier=Ciiva; ComponentLink9Description: https://datasheet.octopart.com:443/GRM188R61E475KE11D-Murata-datasheet-140705133.pdf?src-supplier=Ciiva; ComponentLink10URL: https://datasheet.octopart.com:443/GRM188R61E475KE11D-Murata-datasheet-138742897.pdf?src-supplier=Ciiva; ComponentLink10Description: https://datasheet.octopart.com:443/GRM188R61E475KE11D-Murata-datasheet-138742897.pdf?src-supplier=Ciiva; ComponentLink11URL: https://datasheet.octopart.com/GRM188R61E475KE11D-Murata-datasheet-12515295.pdf; ComponentLink11Description: https://datasheet.octopart.com/GRM188R61E475KE11D-Murata-datasheet-12515295.pdf; ComponentLink12URL: https://datasheet.octopart.com/GRM188R61E475KE11D-Murata-datasheet-12510076.pdf; ComponentLink12Description: https://datasheet.octopart.com/GRM188R61E475KE11D-Murata-datasheet-12510076.pdf; ComponentLink13URL: https://datasheet.octopart.com/GRM188R61E475KE11D-Murata-datasheet-11978611.pdf; ComponentLink13Description: https://datasheet.octopart.com/GRM188R61E475KE11D-Murata-datasheet-11978611.pdf; ComponentLink14URL: https://datasheet.octopart.com/GRM188R61E475KE11D-Murata-datasheet-10025737.pdf; ComponentLink14Description: https://datasheet.octopart.com/GRM188R61E475KE11D-Murata-datasheet-10025737.pdf; ComponentLink15URL: https://datasheet.octopart.com/GRM188R61E475KE11D-Murata-datasheet-8819587.pdf; ComponentLink15Description: https://datasheet.octopart.com/GRM188R61E475KE11D-Murata-datasheet-8819587.pdf; ComponentLink16URL: http://sigma.octopart.com:80/reach_statement/Murata-company-16.pdf?src-supplier=Compliance+Statements; ComponentLink16Description: http://sigma.octopart.com:80/reach_statement/Murata-company-16.pdf?src-supplier=Compliance+Statements
footprint CAPC1608X10N (Chip Capacitor, 2-Leads, Body 1.60x0.80mm, IPC Medium Density)
pins: 1, 2

## C5.1pF 25V 0201
designator C?, comment value 5.1pF  (hidden comment: GJM0335C1E5R1BB01D)
Multilayer Ceramic Capacitors (MLCC) - SMD/SMT 0201 5.1pF 25Volts C0G +/-0.1pF; Manufacturer: Murata; Manufacturer Lifecycle Status: IN PRODUCTION; Temperature Coefficient: 30ppm/°C; Voltage Rating: 25V; Supplier: DigiKey; Supplier Part Number: 490-17793-1-ND; Manufacturer Part Number: GJM0335C1E5R1BB01D; RoHS: Compliant; Category: Ceramic Capacitors; Stock: 129086; Pricing: 1=0.1, 10=0.033, 50=0.0224, 100=0.0191, 500=0.01366, 1000=0.01199, 2500=0.01023, 5000=0.00918 (USD); Case/Package: 0201; Case Code (Imperial): 0201; Case Code (Metric): 0603; Depth: 300µm; Dielectric: C0G; Dielectric Material: Ceramic; Height: 300µm; Length: 600µm; Lifecycle Status: Production; Material: Ceramic; Max Operating Temperature: 125°C; Min Operating Temperature: -55°C; Mounting Technology: Surface Mount; Number of Terminals: 2; Packaging: Tape & Reel; Radiation Hardening: No; REACH SVHC: Yes; Schedule B: 8532240020; Termination: SMD/SMT; Thickness: 300µm; Voltage Rating (DC): 25V; Width: 300µm; ComponentLink1URL: https://datasheet.octopart.com:443/GJM0335C1E5R1BB01D-Murata-datasheet-141270641.pdf?src-supplier=Geoflip; ComponentLink1Description: https://datasheet.octopart.com:443/GJM0335C1E5R1BB01D-Murata-datasheet-141270641.pdf?src-supplier=Geoflip; ComponentLink2URL: https://datasheet.octopart.com:443/GJM0335C1E5R1BB01D-Murata-datasheet-165579666.pdf?src-supplier=TME; ComponentLink2Description: https://datasheet.octopart.com:443/GJM0335C1E5R1BB01D-Murata-datasheet-165579666.pdf?src-supplier=TME; ComponentLink3URL: https://datasheet.octopart.com:443/GJM0335C1E5R1BB01D-Murata-datasheet-140663836.pdf?src-supplier=Ciiva; ComponentLink3Description: https://datasheet.octopart.com:443/GJM0335C1E5R1BB01D-Murata-datasheet-140663836.pdf?src-supplier=Ciiva; ComponentLink4URL: https://datasheet.octopart.com:443/GJM0335C1E5R1BB01D-Murata-datasheet-138722133.pdf?src-supplier=Ciiva; ComponentLink4Description: https://datasheet.octopart.com:443/GJM0335C1E5R1BB01D-Murata-datasheet-138722133.pdf?src-supplier=Ciiva; ComponentLink5URL: https://datasheet.octopart.com/GJM0335C1E5R1BB01D-Murata-datasheet-12515295.pdf; ComponentLink5Description: https://datasheet.octopart.com/GJM0335C1E5R1BB01D-Murata-datasheet-12515295.pdf; ComponentLink6URL: https://datasheet.octopart.com/GJM0335C1E5R1BB01D-Murata-datasheet-12510076.pdf; ComponentLink6Description: https://datasheet.octopart.com/GJM0335C1E5R1BB01D-Murata-datasheet-12510076.pdf; ComponentLink7URL: https://datasheet.octopart.com/GJM0335C1E5R1BB01D-Murata-datasheet-11978611.pdf; ComponentLink7Description: https://datasheet.octopart.com/GJM0335C1E5R1BB01D-Murata-datasheet-11978611.pdf; ComponentLink8URL: https://datasheet.octopart.com/GJM0335C1E5R1BB01D-Murata-datasheet-10025737.pdf; ComponentLink8Description: https://datasheet.octopart.com/GJM0335C1E5R1BB01D-Murata-datasheet-10025737.pdf; ComponentLink9URL: https://datasheet.octopart.com/GJM0335C1E5R1BB01D-Murata-datasheet-8819587.pdf; ComponentLink9Description: https://datasheet.octopart.com/GJM0335C1E5R1BB01D-Murata-datasheet-8819587.pdf; ComponentLink10URL: https://datasheet.octopart.com/GJM0335C1E5R1BB01D-Murata-datasheet-14405836.pdf; ComponentLink10Description: https://datasheet.octopart.com/GJM0335C1E5R1BB01D-Murata-datasheet-14405836.pdf; ComponentLink11URL: http://sigma.octopart.com:80/reach_statement/Murata-company-16.pdf?src-supplier=Compliance+Statements; ComponentLink11Description: http://sigma.octopart.com:80/reach_statement/Murata-company-16.pdf?src-supplier=Compliance+Statements
footprint CAPC0603X03N (Chip Capacitor, 2-Leads, Body 0.60x0.30mm, IPC Medium Density)
pins: 1, 2

## C6.8pF 25V 0201
designator C?, comment value 6.8pF  (hidden comment: GRM0335C1E6R8BA01D)
25V 6.8pF C0G 0201 Multilayer Ceramic Capacitors MLCC - SMD/SMT ROHS; Manufacturer: Murata; Manufacturer Lifecycle Status: IN PRODUCTION; Temperature Coefficient: 30ppm/°C; Supplier: DigiKey; Supplier Part Number: 490-14551-1-ND; Manufacturer Part Number: GRM0335C1E6R8BA01D; RoHS: Compliant; Category: Ceramic Capacitors; Stock: 67465; Pricing: 1=0.1, 10=0.017, 50=0.011, 100=0.0093, 500=0.00644, 1000=0.00556, 2500=0.00464, 5000=0.00409 (USD); Case/Package: 0201; Case Code (Imperial): 0201; Case Code (Metric): 0603; Dielectric: C0G; Dielectric Material: Ceramic; Export Control Classification Number (ECCN) Code: EAR99; Height: 300µm; Harmonized Tariff Schedule (HTS) Code: 8532.24.00.20; Introduction Date: 2013-05-17; Length: 600µm; Lifecycle Status: Production; Material: Ceramic; Max Operating Temperature: 125°C; Min Operating Temperature: -55°C; Mounting Technology: Surface Mount; Number of Terminals: 2; REACH SVHC: Yes; Schedule B: 8532240020, 8532240020|8532240020|8532240020|8532240020|8532240020; Termination: SMD/SMT; Thickness: 300µm; Voltage Rating: 25V; Voltage Rating (DC): 25V; Width: 300µm; ComponentLink1URL: https://datasheet.octopart.com:443/GRM0335C1E6R8BA01D-Murata-datasheet-165579666.pdf?src-supplier=TME; ComponentLink1Description: https://datasheet.octopart.com:443/GRM0335C1E6R8BA01D-Murata-datasheet-165579666.pdf?src-supplier=TME; ComponentLink2URL: https://datasheet.octopart.com:443/GRM0335C1E6R8BA01D-Murata-datasheet-141274003.pdf?src-supplier=Ciiva; ComponentLink2Description: https://datasheet.octopart.com:443/GRM0335C1E6R8BA01D-Murata-datasheet-141274003.pdf?src-supplier=Ciiva; ComponentLink3URL: https://datasheet.octopart.com:443/GRM0335C1E6R8BA01D-Murata-datasheet-140674147.pdf?src-supplier=Ciiva; ComponentLink3Description: https://datasheet.octopart.com:443/GRM0335C1E6R8BA01D-Murata-datasheet-140674147.pdf?src-supplier=Ciiva; ComponentLink4URL: https://datasheet.octopart.com:443/GRM0335C1E6R8BA01D-Murata-datasheet-138736930.pdf?src-supplier=Ciiva; ComponentLink4Description: https://datasheet.octopart.com:443/GRM0335C1E6R8BA01D-Murata-datasheet-138736930.pdf?src-supplier=Ciiva; ComponentLink5URL: https://datasheet.octopart.com/GRM0335C1E6R8BA01D-Murata-datasheet-12515295.pdf; ComponentLink5Description: https://datasheet.octopart.com/GRM0335C1E6R8BA01D-Murata-datasheet-12515295.pdf; ComponentLink6URL: https://datasheet.octopart.com/GRM0335C1E6R8BA01D-Murata-datasheet-12510076.pdf; ComponentLink6Description: https://datasheet.octopart.com/GRM0335C1E6R8BA01D-Murata-datasheet-12510076.pdf; ComponentLink7URL: https://datasheet.octopart.com/GRM0335C1E6R8BA01D-Murata-datasheet-11978611.pdf; ComponentLink7Description: https://datasheet.octopart.com/GRM0335C1E6R8BA01D-Murata-datasheet-11978611.pdf; ComponentLink8URL: https://datasheet.octopart.com/GRM0335C1E6R8BA01D-Murata-datasheet-10025737.pdf; ComponentLink8Description: https://datasheet.octopart.com/GRM0335C1E6R8BA01D-Murata-datasheet-10025737.pdf; ComponentLink9URL: https://datasheet.octopart.com/GRM0335C1E6R8BA01D-Murata-datasheet-8819587.pdf; ComponentLink9Description: https://datasheet.octopart.com/GRM0335C1E6R8BA01D-Murata-datasheet-8819587.pdf; ComponentLink10URL: https://datasheet.octopart.com/GRM0335C1E6R8BA01D-Murata-datasheet-14398120.pdf; ComponentLink10Description: https://datasheet.octopart.com/GRM0335C1E6R8BA01D-Murata-datasheet-14398120.pdf; ComponentLink11URL: http://sigma.octopart.com:80/reach_statement/Murata-company-16.pdf?src-supplier=Compliance+Statements; ComponentLink11Description: http://sigma.octopart.com:80/reach_statement/Murata-company-16.pdf?src-supplier=Compliance+Statements
footprint CAPC0603X03N (Chip Capacitor, 2-Leads, Body 0.60x0.30mm, IPC Medium Density)
pins: 1, 2